# Altium footprint library 2019-12-07_07-09-16.PcbLib: 3 footprints
Each footprint in its own frame and in the unit in brackets; x right, y up, seen from the top. Pads: shape width x height; smd on the part's side, far side on the other; paste and mask are expansions set on the pad; w line width, h text height; cw(c..) or ccw(c..) is an arc to the next point about the centre after c.
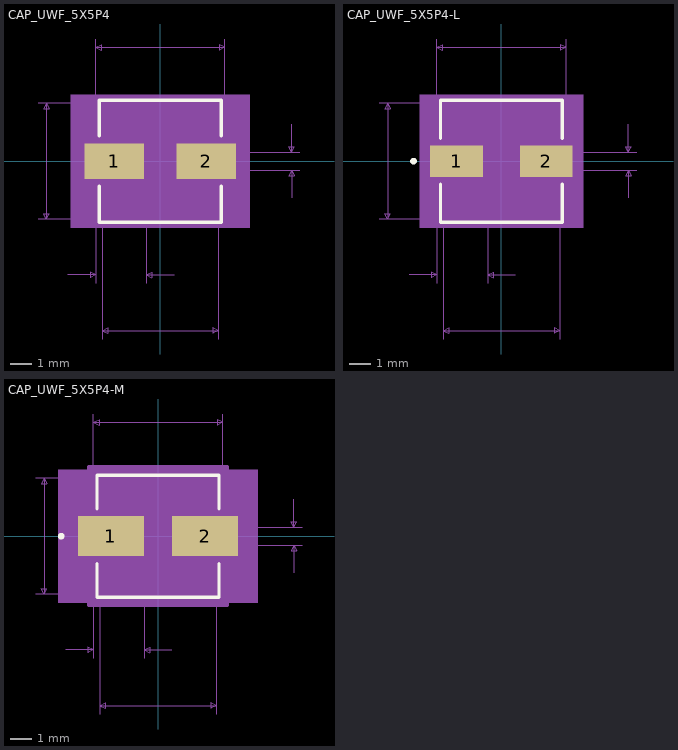
[diagram p0: the footprints below, top view; thin cyan lines are the x and y axes]

## CAP_UWF_5X5P4 [mil]
pads (2):
  rect 107x64 smd paste+0 mask+0: 1(-82.5,0) 2(82.5,0)
Top Overlay:
  lines w6: -109.5,-45.1 -109.5,-109.5 109.5,-109.5 109.5,-45.1 ; -109.5,45.1 -109.5,109.5 109.5,109.5 109.5,45.1
Mechanical 5:
  region: 161,-119.5 -161,-119.5 -161,119.5 161,119.5
Mechanical 7:
  lines w1: -219.5,-104.5 -104.5,-104.5 -104.5,-319.5 ; -219.5,104.5 -104.5,104.5 ; -166,-204.5 -116,-204.5 ; -116,-219.5 -116,-42 ; -116,42 -116,219.5 ; -25,-219.5 -25,-22 ; 25,-204.5 -25,-204.5 ; 104.5,-319.5 104.5,-104.5 ; 116,42 116,219.5 ; 146,-16 251,-16 ; 146,16 251,16 ; 236,-66 236,-16 ; 236,66 236,16 ; -204.5,-104.5 -204.5,104.5 ; -204.5,-104.5 -209.5,-94.5 -199.5,-94.5 -204.5,-104.5 ; -204.5,104.5 -209.5,94.5 -199.5,94.5 -204.5,104.5 ; -116,-204.5 -126,-199.5 -126,-209.5 -116,-204.5 ; -116,204.5 116,204.5 ; -116,204.5 -106,209.5 -106,199.5 -116,204.5 ; -104.5,-304.5 104.5,-304.5 ; -104.5,-304.5 -94.5,-299.5 -94.5,-309.5 -104.5,-304.5 ; -25,-204.5 -15,-199.5 -15,-209.5 -25,-204.5 ; 104.5,-304.5 94.5,-299.5 94.5,-309.5 104.5,-304.5 ; 116,204.5 106,209.5 106,199.5 116,204.5 ; 236,-16 231,-26 241,-26 236,-16 ; 236,16 231,26 241,26 236,16
  text "Default Padstyle: RX107Y64D0T" at -362.5,-443 h50
  text "Alternate 1 Padstyle: OX60Y90D30P" at -412.5,-543 h50
  text "Alternate 2 Padstyle: OX90Y60D30P" at -412.5,-643 h50
  text "0.032in/0.813mm" at 256,-12.5 h25
  text "0.232in/5.893mm" at -93.75,224.5 h25
  text "0.209in/5.309mm" at -412,-12.5 h25
  text "0.091in/2.311mm" at -164.25,-249.5 h25
  text "0.209in/5.309mm" at -93.75,-349.5 h25
Mechanical 13:
  circle w0: c-84.5,0 r0
  lines w1: -104.5,-52.25 -52.25,-104.5 ; -104.5,52.25 -52.25,104.5 ; -104.5,-104.5 104.5,-104.5 104.5,104.5 -104.5,104.5 -104.5,-104.5
Mechanical 15:
  region: -114.5,-42 -146,-42 -146,42 -114.5,42 -114.5,114.5 114.5,114.5 114.5,42 146,42 146,-42 114.5,-42 114.5,-114.5 -114.5,-114.5
  lines w6: -146,-42 -146,42 -114.5,42 -114.5,114.5 114.5,114.5 114.5,42 146,42 146,-42 114.5,-42 114.5,-114.5 -114.5,-114.5 -114.5,-42 -146,-42
3D body: height 10, standoff 0, extent 0,0 10,10

## CAP_UWF_5X5P4-L [mil]
pads (2):
  rect 95x56 smd paste+0 mask+0: 1(-80.5,0) 2(80.5,0)
Top Overlay:
  circle w6: c-158,0 r3
  lines w6: -109.5,-41.1 -109.5,-109.5 109.5,-109.5 109.5,-41.1 ; -109.5,41.1 -109.5,109.5 109.5,109.5 109.5,41.1
Mechanical 5:
  region: 147,-119.5 -147,-119.5 -147,119.5 147,119.5
Mechanical 7:
  lines w1: -219.5,-104.5 -104.5,-104.5 -104.5,-319.5 ; -219.5,104.5 -104.5,104.5 ; -166,-204.5 -116,-204.5 ; -116,-219.5 -116,-38 ; -116,38 -116,219.5 ; -25,-219.5 -25,-18 ; 25,-204.5 -25,-204.5 ; 104.5,-319.5 104.5,-104.5 ; 116,38 116,219.5 ; 138,-16 243,-16 ; 138,16 243,16 ; 228,-66 228,-16 ; 228,66 228,16 ; -204.5,-104.5 -204.5,104.5 ; -204.5,-104.5 -209.5,-94.5 -199.5,-94.5 -204.5,-104.5 ; -204.5,104.5 -209.5,94.5 -199.5,94.5 -204.5,104.5 ; -116,-204.5 -126,-199.5 -126,-209.5 -116,-204.5 ; -116,204.5 116,204.5 ; -116,204.5 -106,209.5 -106,199.5 -116,204.5 ; -104.5,-304.5 104.5,-304.5 ; -104.5,-304.5 -94.5,-299.5 -94.5,-309.5 -104.5,-304.5 ; -25,-204.5 -15,-199.5 -15,-209.5 -25,-204.5 ; 104.5,-304.5 94.5,-299.5 94.5,-309.5 104.5,-304.5 ; 116,204.5 106,209.5 106,199.5 116,204.5 ; 228,-16 223,-26 233,-26 228,-16 ; 228,16 223,26 233,26 228,16
  text "Default Padstyle: RX95Y56D0T" at -350,-447 h50
  text "Alternate 1 Padstyle: OX60Y90D30P" at -412.5,-547 h50
  text "Alternate 2 Padstyle: OX90Y60D30P" at -412.5,-647 h50
  text "0.032in/0.813mm" at 248,-12.5 h25
  text "0.232in/5.893mm" at -93.75,224.5 h25
  text "0.209in/5.309mm" at -412,-12.5 h25
  text "0.091in/2.311mm" at -164.25,-249.5 h25
  text "0.209in/5.309mm" at -93.75,-349.5 h25
Mechanical 13:
  circle w0: c-84.5,0 r3
  lines w1: -104.5,-52.25 -52.25,-104.5 ; -104.5,52.25 -52.25,104.5 ; -104.5,-104.5 104.5,-104.5 104.5,104.5 -104.5,104.5 -104.5,-104.5
Mechanical 15:
  region: -108.5,-32 -132,-32 -132,32 -108.5,32 -108.5,108.5 108.5,108.5 108.5,32 132,32 132,-32 108.5,-32 108.5,-108.5 -108.5,-108.5
  lines w6: -132,-32 -132,32 -108.5,32 -108.5,108.5 108.5,108.5 108.5,32 132,32 132,-32 108.5,-32 108.5,-108.5 -108.5,-108.5 -108.5,-32 -132,-32
3D body: height 10, standoff 0, extent 0,0 10,10

## CAP_UWF_5X5P4-M [mil]
pads (2):
  rect 119x72 smd paste+0 mask+0: 1(-84.5,0) 2(84.5,0)
Top Overlay:
  circle w6: c-174,0 r3
  lines w6: -109.5,-49.1 -109.5,-109.5 109.5,-109.5 109.5,-49.1 ; -109.5,49.1 -109.5,109.5 109.5,109.5 109.5,49.1
Mechanical 5:
  region: 179,-119.5 -179,-119.5 -179,119.5 179,119.5
Mechanical 7:
  lines w1: -219.5,-104.5 -104.5,-104.5 -104.5,-319.5 ; -219.5,104.5 -104.5,104.5 ; -166,-204.5 -116,-204.5 ; -116,-219.5 -116,-46 ; -116,46 -116,219.5 ; -25,-219.5 -25,-26 ; 25,-204.5 -25,-204.5 ; 104.5,-319.5 104.5,-104.5 ; 116,46 116,219.5 ; 154,-16 259,-16 ; 154,16 259,16 ; 244,-66 244,-16 ; 244,66 244,16 ; -204.5,-104.5 -204.5,104.5 ; -204.5,-104.5 -209.5,-94.5 -199.5,-94.5 -204.5,-104.5 ; -204.5,104.5 -209.5,94.5 -199.5,94.5 -204.5,104.5 ; -116,-204.5 -126,-199.5 -126,-209.5 -116,-204.5 ; -116,204.5 116,204.5 ; -116,204.5 -106,209.5 -106,199.5 -116,204.5 ; -104.5,-304.5 104.5,-304.5 ; -104.5,-304.5 -94.5,-299.5 -94.5,-309.5 -104.5,-304.5 ; -25,-204.5 -15,-199.5 -15,-209.5 -25,-204.5 ; 104.5,-304.5 94.5,-299.5 94.5,-309.5 104.5,-304.5 ; 116,204.5 106,209.5 106,199.5 116,204.5 ; 244,-16 239,-26 249,-26 244,-16 ; 244,16 239,26 249,26 244,16
  text "Default Padstyle: RX119Y72D0T" at -362.5,-439 h50
  text "Alternate 1 Padstyle: OX60Y90D30P" at -412.5,-539 h50
  text "Alternate 2 Padstyle: OX90Y60D30P" at -412.5,-639 h50
  text "0.032in/0.813mm" at 264,-12.5 h25
  text "0.232in/5.893mm" at -93.75,224.5 h25
  text "0.209in/5.309mm" at -412,-12.5 h25
  text "0.091in/2.311mm" at -164.25,-249.5 h25
  text "0.209in/5.309mm" at -93.75,-349.5 h25
Mechanical 13:
  circle w0: c-84.5,0 r3
  lines w1: -104.5,-52.25 -52.25,-104.5 ; -104.5,52.25 -52.25,104.5 ; -104.5,-104.5 104.5,-104.5 104.5,104.5 -104.5,104.5 -104.5,-104.5
Mechanical 15:
  region: -124.5,-56 -164,-56 -164,56 -124.5,56 -124.5,124.5 124.5,124.5 124.5,56 164,56 164,-56 124.5,-56 124.5,-124.5 -124.5,-124.5
  lines w6: -164,-56 -164,56 -124.5,56 -124.5,124.5 124.5,124.5 124.5,56 164,56 164,-56 124.5,-56 124.5,-124.5 -124.5,-124.5 -124.5,-56 -164,-56
3D body: height 10, standoff 0, extent 0,0 10,10